# Altium footprint library Transformer.PcbLib: 8 footprints
Each footprint in its own frame and in the unit in brackets; x right, y up, seen from the top. Pads: shape width x height; smd on the part's side, far side on the other; paste and mask are expansions set on the pad; w line width, h text height; cw(c..) or ccw(c..) is an arc to the next point about the centre after c.
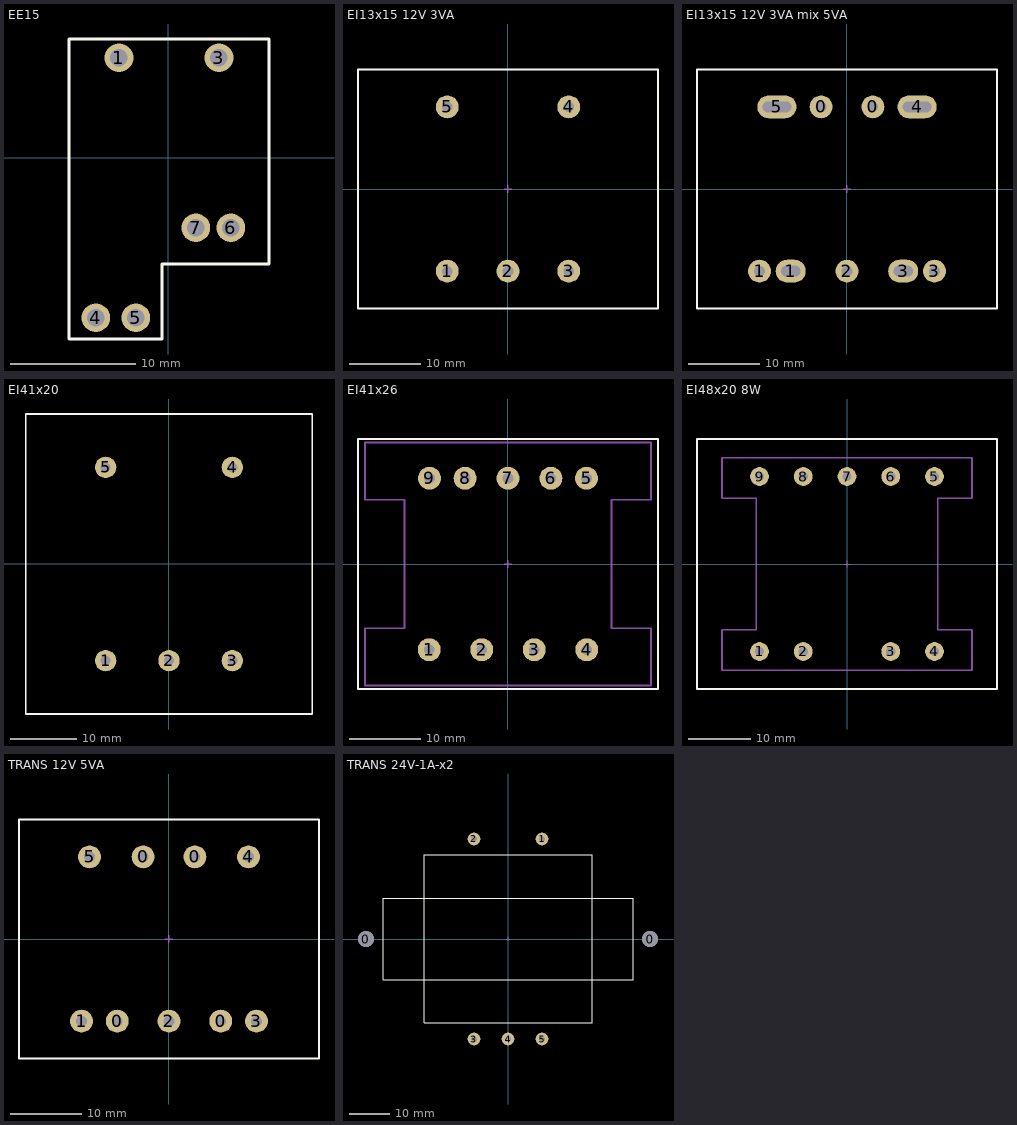
[diagram p0: the footprints below, top view; thin cyan lines are the x and y axes]

## EE15 [mm]
pads (6):
  round 2.3 hole 1.4: 1(-3.95,8) 3(4.05,8) 4(-5.8,-12.8) 5(-2.6,-12.8) 6(5,-5.6) 7(2.2,-5.6)
Top Overlay:
  lines w0.254: -7.95,-14.5 -0.5,-14.5 -0.5,-8.5 8.05,-8.5 8.05,9.5 -7.95,9.5 -7.95,-14.5
Top Designator (Mech4):
  text ".Designator" at -3.66,-2.844 h1.52
3D body "Part1.STEP": height 12.35, standoff 0.35, extent -7.5,-14.6 7.5,9.4

## EI13x15 12V 3VA [mm] "42*35*30"
pads (5):
  round 3.2 hole 1.5: 1(-8.5,-11.5) 2(0,-11.5) 3(8.5,-11.5) 4(8.5,11.5) 5(-8.5,11.5)
Top Overlay:
  lines w0.254: -21,-16.75 21,-16.75 21,16.75 -21,16.75 -21,-16.75
Top Designator (Mech4):
  text ".Designator" at -3.71,-0.344 h1.52
Mechanical 15:
  lines w0.2: -0.5,0 0.5,0 ; 0,-0.5 0,0.5
3D body: height 5, standoff 0, extent -12.5,-14 12.5,14
3D body: height 19.9, standoff 4.1, extent -21.05,-16.8 21.05,16.8
3D body: height 20, standoff 4, extent -21,-16.75 21,16.75
3D body: height 1, standoff -3, extent 7.75,-12.25 9.25,-10.75
3D body: height 1, standoff -3, extent -0.75,-12.25 0.75,-10.75
3D body: height 1, standoff -3, extent -9.25,-12.25 -7.75,-10.75
3D body: height 1, standoff -3, extent 7.75,10.75 9.25,12.25
3D body: height 1, standoff -3, extent -9.25,10.75 -7.75,12.25
3D body: height 25.5, standoff 0.5, extent -12.5,-11 12.5,11

## EI13x15 12V 3VA mix 5VA [mm] "42*35*30"
pads (9):
  round 3.2 hole 1.5: 0(-3.625,11.5) 0(3.625,11.5) 1(-12.25,-11.5) 2(0,-11.5) 3(12.25,-11.5)
  oval 4.2x3.2 hole 1.5 slot 2.7 at 0 deg: 1(-7.875,-11.5) 3(7.875,-11.5)
  oval 5.5x3.2 hole 1.5 slot 4 at 0 deg: 4(9.813,11.5) 5(-9.813,11.5)
Top Overlay:
  lines w0.254: -21,-16.75 21,-16.75 21,16.75 -21,16.75 -21,-16.75
Top Designator (Mech4):
  text ".Designator" at -3.71,-0.344 h1.52
Mechanical 15:
  lines w0.2: -0.5,0 0.5,0 ; 0,-0.5 0,0.5
3D body: height 1, standoff -3, extent 7.125,-12.25 8.625,-10.75
3D body: height 1, standoff -3, extent -10.563,10.75 -9.062,12.25
3D body: height 5, standoff 0, extent -12.5,-14 12.5,14
3D body: height 19.9, standoff 4.1, extent -21.05,-16.8 21.05,16.8
3D body: height 20, standoff 4, extent -21,-16.75 21,16.75
3D body: height 1, standoff -3, extent -0.75,-12.25 0.75,-10.75
3D body: height 1, standoff -3, extent -8.625,-12.25 -7.125,-10.75
3D body: height 1, standoff -3, extent 9.062,10.75 10.563,12.25
3D body: height 25.5, standoff 0.5, extent -12.5,-11 12.5,11

## EI41x20 [mm] "41*33*46"
pads (5):
  round 3.2 hole 1.5: 1(-9.5,-14.5) 2(0,-14.5) 3(9.5,-14.5) 4(9.5,14.5) 5(-9.5,14.5)
Top Overlay:
  lines w0.254: -21.5,-22.5 21.5,-22.5 21.5,22.5 -21.5,22.5 -21.5,-22.5
Top Designator (Mech4):
  text ".Designator" at -3.71,-0.344 h1.52
3D body "EI41_transformer.STEP": height 36, standoff 0, extent -21.5,-22.5 21.5,22.5

## EI41x26 [mm] "41*33*46"
pads (9):
  round 3.2 hole 1.5: 1(-11.025,-12) 2(-3.675,-12) 3(3.675,-12) 4(11.025,-12) 5(11,12) 6(6,12) 7(0,12) 8(-6,12) 9(-11,12)
Top Overlay:
  lines w0.254: -21,-17.5 -21,17.5 21,17.5 21,-17.5 -21,-17.5
Top Designator:
  lines w0.254: -20,-17 -20,-9 -14.5,-9 -14.5,9 -20,9 -20,17 20,17 20,9 14.5,9 14.5,-9 20,-9 20,-17 -20,-17
Top Designator (Mech4):
  text ".Designator" at -3.71,-0.344 h1.52
Mechanical 15:
  lines w0.2: -0.5,0 0.5,0 ; 0,-0.5 0,0.5
3D body: height 1, standoff -3, extent 10.275,-12.75 11.775,-11.25
3D body: height 1, standoff -3, extent 2.925,-12.75 4.425,-11.25
3D body: height 1, standoff -3, extent -4.425,-12.75 -2.925,-11.25
3D body: height 1, standoff -3, extent -11.775,-12.75 -10.275,-11.25
3D body: height 1, standoff -3, extent 10.25,11.25 11.75,12.75
3D body: height 1, standoff -3, extent 5.25,11.25 6.75,12.75
3D body: height 1, standoff -3, extent -0.75,11.25 0.75,12.75
3D body: height 1, standoff -3, extent -6.75,11.25 -5.25,12.75
3D body: height 1, standoff -3, extent -11.75,11.25 -10.25,12.75
3D body: height 11, standoff 0, extent -20,-17 20,17
3D body: height 46.5, standoff 35.5, extent -13.5,-11 13.5,11
3D body: height 36.9, standoff 10.1, extent -21,-17.5 21,17.5
3D body: height 37, standoff 10, extent -20.95,-17.45 20.95,17.45

## EI48x20 8W [mm] "48*40*36 mm"
pads (9):
  round 3 hole 1.5: 1(-14,-14) 2(-7,-14) 3(7,-14) 4(14,-14) 5(14,14) 6(7,14) 7(0,14) 8(-7,14) 9(-14,14)
Top Overlay:
  lines w0.254: -24,-20 -24,20 24,20 24,-20 -24,-20
Top Designator:
  lines w0.254: -20,-17 -20,-10.5 -14.5,-10.5 -14.5,10.5 -20,10.5 -20,17 20,17 20,10.5 14.5,10.5 14.5,-10.5 20,-10.5 20,-17 -20,-17
Top Designator (Mech4):
  text ".Designator" at -3.71,-0.344 h1.52
Mechanical 15:
  lines w0.1: -0.5,0 0.5,0 ; 0,-0.5 0,0.5
3D body: height 38, standoff 22, extent -19,-15 19,15
3D body: height 1, standoff -3, extent 13.25,-14.75 14.75,-13.25
3D body: height 1, standoff -3, extent 6.25,-14.75 7.75,-13.25
3D body: height 1, standoff -3, extent -7.75,-14.75 -6.25,-13.25
3D body: height 1, standoff -3, extent -14.75,-14.75 -13.25,-13.25
3D body: height 1, standoff -3, extent 13.25,13.25 14.75,14.75
3D body: height 1, standoff -3, extent 6.25,13.25 7.75,14.75
3D body: height 1, standoff -3, extent -0.75,13.25 0.75,14.75
3D body: height 1, standoff -3, extent -7.75,13.25 -6.25,14.75
3D body: height 1, standoff -3, extent -14.75,13.25 -13.25,14.75
3D body: height 16, standoff 0, extent -20,-17 20,17
3D body: height 28, standoff 8, extent -24,-20 24,20

## TRANS 12V 5VA [mm] "42*34*40"
pads (9):
  round 3.2 hole 1.5: 0(-7.25,-11.5) 0(-3.625,11.5) 0(3.625,11.5) 0(7.25,-11.5) 1(-12.25,-11.5) 2(0,-11.5) 3(12.25,-11.5) 4(11.125,11.5) 5(-11.125,11.5)
Top Overlay:
  lines w0.254: -21,-16.75 21,-16.75 21,16.75 -21,16.75 -21,-16.75
Top Designator (Mech4):
  text ".Designator" at -3.71,-0.344 h1.52
Mechanical 15:
  lines w0.2: -0.5,0 0.5,0 ; 0,-0.5 0,0.5
3D body: height 1, standoff -3, extent 10.375,10.75 11.875,12.25
3D body: height 1, standoff -3, extent -4.375,10.75 -2.875,12.25
3D body: height 1, standoff -3, extent 11.5,-12.25 13,-10.75
3D body: height 1, standoff -3, extent -8,-12.25 -6.5,-10.75
3D body: height 19.9, standoff 4.1, extent -21.05,-16.8 21.05,16.8
3D body: height 5, standoff 0, extent -12.5,-14 12.5,14
3D body: height 20, standoff 4, extent -21,-16.75 21,16.75
3D body: height 25.5, standoff 0.5, extent -12.5,-11 12.5,11
3D body: height 1, standoff -3, extent 6.5,-12.25 8,-10.75
3D body: height 1, standoff -3, extent -0.75,-12.25 0.75,-10.75
3D body: height 1, standoff -3, extent -13,-12.25 -11.5,-10.75
3D body: height 1, standoff -3, extent 2.875,10.75 4.375,12.25
3D body: height 1, standoff -3, extent -11.875,10.75 -10.375,12.25

## TRANS 24V-1A-x2 [mm]
pads (7):
  round 4 hole 4: 0(-35.5,0) 0(35.5,0)
  round 3.2 hole 1.5: 1(8.5,25) 2(-8.5,25) 3(-8.5,-25) 4(0,-25) 5(8.5,-25)
Top Overlay:
  lines w0.254: -31.25,-10.25 -31.25,10.25 31.25,10.25 31.25,-10.25 -31.25,-10.25 ; -21,-21 -21,21 21,21 21,-21 -21,-21
Top Designator (Mech4):
  text ".Designator" at -3.71,-0.344 h1.52
Mechanical 15:
  lines w0.2: -0.5,0 0.5,0 ; 0,-0.5 0,0.5
3D body: height 51, standoff 0, extent -31.25,-10.25 31.25,10.25
3D body: height 42, standoff 7, extent -21,-21 21,21